# Altium footprint library FootPrintLib_9.PcbLib: 287 footprints (part 15 of 18)
Each footprint in its own frame and in the unit in brackets; x right, y up, seen from the top. Pads: shape width x height; smd on the part's side, far side on the other; paste and mask are expansions set on the pad; w line width, h text height; cw(c..) or ccw(c..) is an arc to the next point about the centre after c.
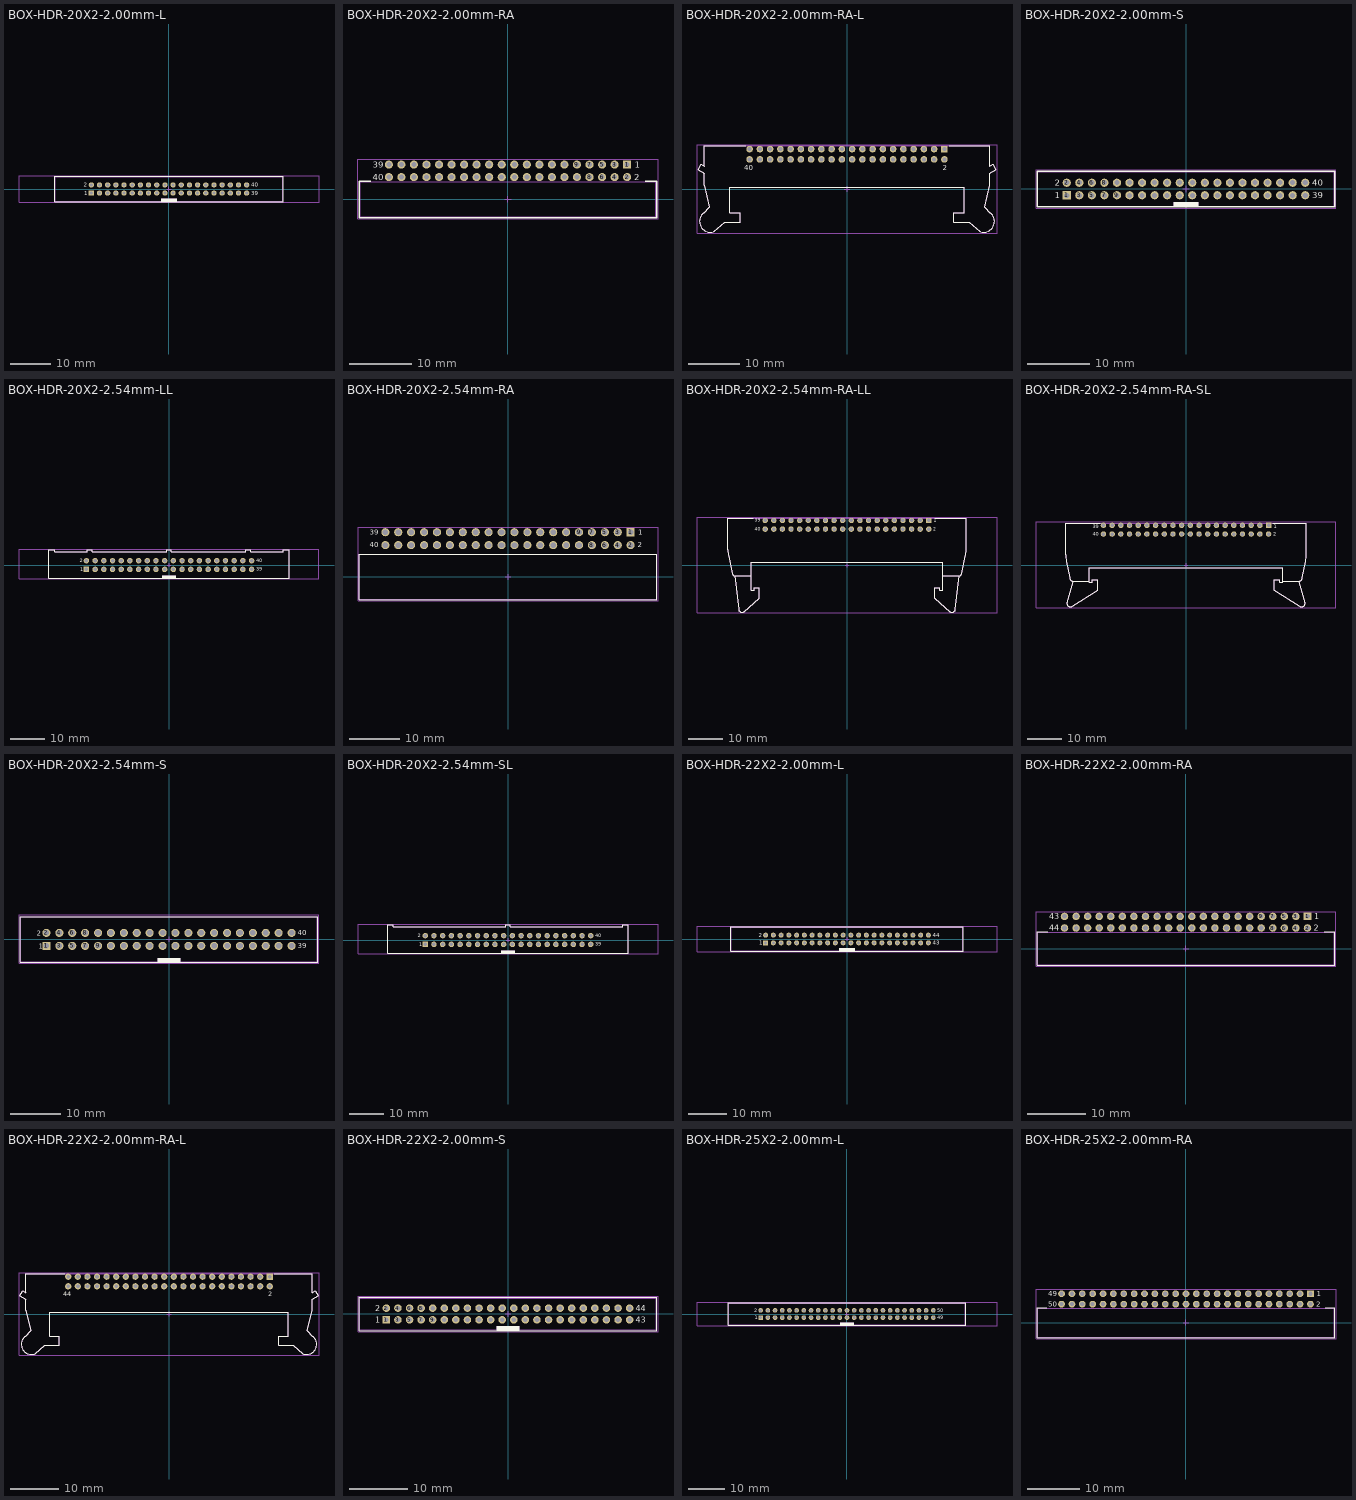
[diagram p14: the footprints below, top view; thin cyan lines are the x and y axes]

## BOX-HDR-20X2-2.00mm-L [mm] "2.00mm Male Box Header with Lever, 40p"
height 16.85
pads (40):
  rect 1.3x1.3 hole 0.8: 1(-19,-1)
  round 1.3 hole 0.8: 2(-19,1) 3(-17,-1) 4(-17,1) 5(-15,-1) 6(-15,1) 7(-13,-1) 8(-13,1) 9(-11,-1) 10(-11,1) 11(-9,-1) 12(-9,1) 13(-7,-1) 14(-7,1) 15(-5,-1) 16(-5,1) 17(-3,-1) 18(-3,1) 19(-1,-1) 20(-1,1) 21(1,-1) 22(1,1) 23(3,-1) 24(3,1) 25(5,-1) 26(5,1) 27(7,-1) 28(7,1) 29(9,-1) 30(9,1) 31(11,-1) 32(11,1) 33(13,-1) 34(13,1) 35(15,-1) 36(15,1) 37(17,-1) 38(17,1) 39(19,-1) 40(19,1)
Top Overlay:
  rectangle: -2,-3.1 2,-2.3
  lines w0.2: -28,-3.1 -28,3.1 28,3.1 28,-3.1 -28,-3.1
  text "1" at -20.7,-1.5 h1.02
  text "2" at -20.8,0.5 h1.02
  text "40" at 20.1,0.5 h1.02
  text "39" at 20.1,-1.5 h1.02
Mechanical 13:
  rectangle: -2,-3 2,-2.3
  lines w0.1: -27.85,-3 -27.85,3 27.85,3 27.85,-3 -27.85,-3
Mechanical 15:
  lines w0.05: -0.5,0 0.5,0 ; 0,-0.5 0,0.5 ; -36.7,-3.3 36.7,-3.3 36.7,3.3 -36.7,3.3 -36.7,-3.3
3D body "62504022021.stp": height 16.9, standoff -2.95, extent -29.062,-3 29.063,3

## BOX-HDR-20X2-2.00mm-RA [mm] "2.00mm Male Angled Box Header, 40p"
height 5.4
pads (40):
  rect 1.3x1.3 hole 0.8: 1(19,5.55)
  round 1.3 hole 0.8: 2(19,3.55) 3(17,5.55) 4(17,3.55) 5(15,5.55) 6(15,3.55) 7(13,5.55) 8(13,3.55) 9(11,5.55) 10(11,3.55) 11(9,5.55) 12(9,3.55) 13(7,5.55) 14(7,3.55) 15(5,5.55) 16(5,3.55) 17(3,5.55) 18(3,3.55) 19(1,5.55) 20(1,3.55) 21(-1,5.55) 22(-1,3.55) 23(-3,5.55) 24(-3,3.55) 25(-5,5.55) 26(-5,3.55) 27(-7,5.55) 28(-7,3.55) 29(-9,5.55) 30(-9,3.55) 31(-11,5.55) 32(-11,3.55) 33(-13,5.55) 34(-13,3.55) 35(-15,5.55) 36(-15,3.55) 37(-17,5.55) 38(-17,3.55) 39(-19,5.55) 40(-19,3.55)
Top Overlay:
  lines w0.2: -21.875,2.9 -23.725,2.9 -23.725,-2.9 23.725,-2.9 23.725,2.9 21.875,2.9
  text "1" at 20.2,5.075 h1.02
  text "2" at 20.1,3.075 h1.02
  text "39" at -21.6,5.075 h1.02
  text "40" at -21.6,3.075 h1.02
Mechanical 13:
  lines w0.1: -23.6,-2.8 -23.6,2.8 23.6,2.8 23.6,-2.8 -23.6,-2.8
Mechanical 15:
  lines w0.05: -0.5,0 0.5,0 ; 0,-0.5 0,0.5 ; -23.925,-3.1 -23.925,6.4 23.925,6.4 23.925,-3.1 -23.925,-3.1
3D body "62504021721 (rev1).stp": height 5.5, standoff -2.85, extent -23.6,-2.8 23.6,5.8

## BOX-HDR-20X2-2.00mm-RA-L [mm] "2.00mm Male Angled Box Header with Lever, 40p"
height 3.15
pads (40):
  rect 1.3x1.3 hole 0.8: 1(19,7.775)
  round 1.3 hole 0.8: 2(19,5.775) 3(17,7.775) 4(17,5.775) 5(15,7.775) 6(15,5.775) 7(13,7.775) 8(13,5.775) 9(11,7.775) 10(11,5.775) 11(9,7.775) 12(9,5.775) 13(7,7.775) 14(7,5.775) 15(5,7.775) 16(5,5.775) 17(3,7.775) 18(3,5.775) 19(1,7.775) 20(1,5.775) 21(-1,7.775) 22(-1,5.775) 23(-3,7.775) 24(-3,5.775) 25(-5,7.775) 26(-5,5.775) 27(-7,7.775) 28(-7,5.775) 29(-9,7.775) 30(-9,5.775) 31(-11,7.775) 32(-11,5.775) 33(-13,7.775) 34(-13,5.775) 35(-15,7.775) 36(-15,5.775) 37(-17,7.775) 38(-17,5.775) 39(-19,7.775) 40(-19,5.775)
Top Overlay:
  lines w0.2: -28.466,4.813 -29.06,3.785 -27.851,3.087 -27.851,0.753 ; -28.46,4.815 -27.848,4.462 ; -27.894,-4.611 ccw(c-26.68,-6.325) -25.865,-8.26 ; -27.892,-4.613 -26.85,-3.535 -27.837,0.738 ; -27.85,4.464 -27.85,8.425 -19.75,8.425 ; -25.866,-8.259 -23.85,-6.475 -20.85,-6.475 -20.85,-4.675 -22.85,-4.675 -22.85,0.325 22.85,0.325 22.85,-4.675 20.85,-4.675 20.85,-6.475 23.85,-6.475 25.866,-8.259 ; 19.95,8.425 27.85,8.425 27.85,4.464 ; 25.865,-8.26 ccw(c26.68,-6.325) 27.894,-4.611 ; 27.837,0.738 26.85,-3.535 27.892,-4.613 ; 27.848,4.462 28.46,4.815 ; 27.851,0.753 27.851,3.087 29.06,3.785 28.466,4.813
  text "40" at -20,3.675 h1.02
  text "2" at 18.7,3.675 h1.02
Mechanical 13:
  lines w0.1: -28.466,4.813 -29.06,3.785 -27.851,3.087 -27.851,0.753 ; -28.46,4.815 -27.848,4.462 ; -27.894,-4.611 ccw(c-26.68,-6.325) -25.865,-8.26 ; -27.892,-4.613 -26.85,-3.535 -27.837,0.738 ; -27.85,4.464 -27.85,8.425 27.85,8.425 ; -25.866,-8.259 -23.85,-6.475 -20.85,-6.475 -20.85,-4.675 -22.85,-4.675 -22.85,0.325 22.85,0.325 22.85,-4.675 20.85,-4.675 20.85,-6.475 23.85,-6.475 25.866,-8.259 ; 25.865,-8.26 ccw(c26.68,-6.325) 27.894,-4.611 ; 27.837,0.738 26.85,-3.535 27.892,-4.613 ; 27.848,4.462 28.46,4.815 ; 27.848,8.423 27.85,8.425 ; 27.85,4.464 27.85,8.425 ; 27.851,0.753 27.851,3.087 29.06,3.785 28.466,4.813
Mechanical 15:
  lines w0.05: -0.5,0 0.5,0 ; 0,-0.5 0,0.5 ; -29.262,-8.625 29.262,-8.625 29.262,8.625 -29.262,8.625 -29.262,-8.625
3D body "62504022121.stp": height 6.1, standoff -3.05, extent -29.062,-8.425 29.062,8.425

## BOX-HDR-20X2-2.00mm-S [mm] "2.00mm Male Box Header, 40p"
height 5.6
pads (40):
  rect 1.3x1.3 hole 0.8: 1(-19,-1)
  round 1.3 hole 0.8: 2(-19,1) 3(-17,-1) 4(-17,1) 5(-15,-1) 6(-15,1) 7(-13,-1) 8(-13,1) 9(-11,-1) 10(-11,1) 11(-9,-1) 12(-9,1) 13(-7,-1) 14(-7,1) 15(-5,-1) 16(-5,1) 17(-3,-1) 18(-3,1) 19(-1,-1) 20(-1,1) 21(1,-1) 22(1,1) 23(3,-1) 24(3,1) 25(5,-1) 26(5,1) 27(7,-1) 28(7,1) 29(9,-1) 30(9,1) 31(11,-1) 32(11,1) 33(13,-1) 34(13,1) 35(15,-1) 36(15,1) 37(17,-1) 38(17,1) 39(19,-1) 40(19,1)
Top Overlay:
  rectangle: -2,-2.85 2,-2.05
  lines w0.2: -23.7,-2.85 23.7,-2.85 23.7,2.85 -23.7,2.85 -23.7,-2.85
  text "40" at 20.1,0.5 h1.02
  text "39" at 20.1,-1.5 h1.02
  text "1" at -20.9,-1.5 h1.02
  text "2" at -20.9,0.5 h1.02
Mechanical 13:
  rectangle: -2,-2.75 2,-2.05
  lines w0.1: -23.6,-2.75 -23.6,2.75 23.6,2.75 23.6,-2.75 -23.6,-2.75
Mechanical 15:
  lines w0.05: -0.5,0 0.5,0 ; 0,-0.5 0,0.5 ; -23.9,-3.05 -23.9,3.05 23.9,3.05 23.9,-3.05 -23.9,-3.05
3D body "62504021621.stp": height 5.65, standoff -2.5, extent -23.6,-2.75 23.6,2.75

## BOX-HDR-20X2-2.54mm-LL [mm] "40 pins, straight, long lever, gold plating"
height 28
pads (40):
  rect 1.6x1.6 hole 1.02: 1(-24.13,-1.27)
  round 1.6 hole 1.02: 2(-24.13,1.27) 3(-21.59,-1.27) 4(-21.59,1.27) 5(-19.05,-1.27) 6(-19.05,1.27) 7(-16.51,-1.27) 8(-16.51,1.27) 9(-13.97,-1.27) 10(-13.97,1.27) 11(-11.43,-1.27) 12(-11.43,1.27) 13(-8.89,-1.27) 14(-8.89,1.27) 15(-6.35,-1.27) 16(-6.35,1.27) 17(-3.81,-1.27) 18(-3.81,1.27) 19(-1.27,-1.27) 20(-1.27,1.27) 21(1.27,-1.27) 22(1.27,1.27) 23(3.81,-1.27) 24(3.81,1.27) 25(6.35,-1.27) 26(6.35,1.27) 27(8.89,-1.27) 28(8.89,1.27) 29(11.43,-1.27) 30(11.43,1.27) 31(13.97,-1.27) 32(13.97,1.27) 33(16.51,-1.27) 34(16.51,1.27) 35(19.05,-1.27) 36(19.05,1.27) 37(21.59,-1.27) 38(21.59,1.27) 39(24.13,-1.27) 40(24.13,1.27)
Top Overlay:
  rectangle: -2.1,-3.85 2.1,-3.04
  lines w0.2: -35.15,-3.85 -35.15,4.45 -33.42,4.45 -33.42,3.85 -23.85,3.85 -23.85,4.45 -22.45,4.45 -22.45,3.85 -0.7,3.85 -0.7,4.45 0.7,4.45 0.7,3.85 22.45,3.85 22.45,4.45 23.85,4.45 23.85,3.85 33.42,3.85 33.42,4.45 35.15,4.45 35.15,-3.85 -35.15,-3.85
  text "1" at -25.95,-1.8 h1.02
  text "2" at -26.15,0.8 h1.02
  text "39" at 25.55,-1.74 h1.02
  text "40" at 25.55,0.8 h1.02
Mechanical 13:
  rectangle: -2.1,-3.85 2.1,-3.04
  lines w0.1: -35.15,-3.85 35.15,-3.85 35.15,4.45 33.42,4.45 33.42,3.85 23.85,3.85 23.85,4.45 22.45,4.45 22.45,3.85 0.7,3.85 0.7,4.45 -0.7,4.45 -0.7,3.85 -22.45,3.85 -22.45,4.45 -23.85,4.45 -23.85,3.85 -33.42,3.85 -33.42,4.45 -35.15,4.45 -35.15,-3.85
Mechanical 15:
  lines w0.05: -0.5,0 0.5,0 ; 0,-0.5 0,0.5 ; -43.85,-4.05 43.85,-4.05 43.85,4.65 -43.85,4.65 -43.85,-4.05
3D body "61204022821 (rev1).stp": height 27.84, standoff -3.35, extent -35.15,-3.86 35.15,4.45

## BOX-HDR-20X2-2.54mm-RA [mm] "40 pins, right angled, gold plating"
height 9.1
pads (40):
  rect 1.6x1.6 hole 1.1: 1(24.13,8.805)
  round 1.6 hole 1.1: 2(24.13,6.265) 3(21.59,8.805) 4(21.59,6.265) 5(19.05,8.805) 6(19.05,6.265) 7(16.51,8.805) 8(16.51,6.265) 9(13.97,8.805) 10(13.97,6.265) 11(11.43,8.805) 12(11.43,6.265) 13(8.89,8.805) 14(8.89,6.265) 15(6.35,8.805) 16(6.35,6.265) 17(3.81,8.805) 18(3.81,6.265) 19(1.27,8.805) 20(1.27,6.265) 21(-1.27,8.805) 22(-1.27,6.265) 23(-3.81,8.805) 24(-3.81,6.265) 25(-6.35,8.805) 26(-6.35,6.265) 27(-8.89,8.805) 28(-8.89,6.265) 29(-11.43,8.805) 30(-11.43,6.265) 31(-13.97,8.805) 32(-13.97,6.265) 33(-16.51,8.805) 34(-16.51,6.265) 35(-19.05,8.805) 36(-19.05,6.265) 37(-21.59,8.805) 38(-21.59,6.265) 39(-24.13,8.805) 40(-24.13,6.265)
Top Overlay:
  lines w0.2: -29.305,-4.5 29.305,-4.5 29.305,4.5 -29.305,4.5 -29.305,-4.5
  text "1" at 25.59,8.34 h1.02
  text "2" at 25.49,5.8 h1.02
  text "39" at -27.2,8.34 h1.02
  text "40" at -27.2,5.8 h1.02
Mechanical 13:
  lines w0.1: -29.23,-4.425 29.23,-4.425 29.23,4.425 -29.23,4.425 -29.23,-4.425
Mechanical 15:
  lines w0.05: -0.5,0 0.5,0 ; 0,-0.5 0,0.5 ; -29.505,-4.7 -29.505,9.805 29.505,9.805 29.505,-4.7 -29.505,-4.7
3D body "61204021721.stp": height 9.23, standoff -2.88, extent -29.23,-4.425 29.23,9.125

## BOX-HDR-20X2-2.54mm-RA-LL [mm] "40 pins, right angeled, long lever, gold plating"
height 10.8
pads (40):
  rect 1.6x1.6 hole 1.02: 1(24.13,13.23)
  round 1.6 hole 1.02: 2(24.13,10.69) 3(21.59,13.23) 4(21.59,10.69) 5(19.05,13.23) 6(19.05,10.69) 7(16.51,13.23) 8(16.51,10.69) 9(13.97,13.23) 10(13.97,10.69) 11(11.43,13.23) 12(11.43,10.69) 13(8.89,13.23) 14(8.89,10.69) 15(6.35,13.23) 16(6.35,10.69) 17(3.81,13.23) 18(3.81,10.69) 19(1.27,13.23) 20(1.27,10.69) 21(-1.27,13.23) 22(-1.27,10.69) 23(-3.81,13.23) 24(-3.81,10.69) 25(-6.35,13.23) 26(-6.35,10.69) 27(-8.89,13.23) 28(-8.89,10.69) 29(-11.43,13.23) 30(-11.43,10.69) 31(-13.97,13.23) 32(-13.97,10.69) 33(-16.51,13.23) 34(-16.51,10.69) 35(-19.05,13.23) 36(-19.05,10.69) 37(-21.59,13.23) 38(-21.59,10.69) 39(-24.13,13.23) 40(-24.13,10.69)
Top Overlay:
  lines w0.2: -35.15,4.54 -35.15,13.85 -27.7,13.85 ; -35.145,4.54 ccw(c-25.15,4.84) -34.904,2.636 -33.859,-2.534 ; -33.853,-2.533 ccw(c-32.93,-2.15) -32.93,-3.15 -28.25,-3.15 ; -33.114,-3.15 -31.968,-13.022 ccw(c-30.98,-12.87) -30.322,-13.623 -25.851,-9.758 ; -25.85,-9.76 -25.85,-6.66 -27.35,-6.66 -27.35,-7.37 -28.25,-7.37 -28.25,0.85 28.25,0.85 28.25,-7.37 27.35,-7.37 27.35,-6.66 25.85,-6.66 25.85,-9.76 ; 25.851,-9.758 30.323,-13.623 ccw(c30.98,-12.87) 31.968,-13.022 33.114,-3.15 ; 26.1,13.85 35.15,13.85 35.15,4.54 ; 28.25,-3.15 32.93,-3.15 ccw(c32.93,-2.15) 33.854,-2.533 ; 33.859,-2.534 34.904,2.636 ccw(c25.15,4.84) 35.146,4.54
  text "2" at 25.45,10.26 h1.02
  text "1" at 25.55,12.66 h1.02
  text "40" at -27.2,10.26 h1.02
  text "39" at -27.2,12.8 h1.02
Mechanical 13:
  lines w0.1: -35.15,4.54 -35.15,13.85 35.15,13.85 35.15,4.54 ; -35.145,4.54 ccw(c-25.15,4.84) -34.904,2.636 -33.859,-2.534 ; -33.853,-2.533 ccw(c-32.93,-2.15) -32.93,-3.15 -28.25,-3.15 ; -33.114,-3.15 -31.968,-13.022 ccw(c-30.98,-12.87) -30.322,-13.623 -25.851,-9.758 ; -25.85,-9.76 -25.85,-6.66 -27.35,-6.66 -27.35,-7.37 -28.25,-7.37 -28.25,0.85 28.25,0.85 28.25,-7.37 27.35,-7.37 27.35,-6.66 25.85,-6.66 25.85,-9.76 ; 25.851,-9.758 30.323,-13.623 ccw(c30.98,-12.87) 31.968,-13.022 33.114,-3.15 ; 28.25,-3.15 32.93,-3.15 ccw(c32.93,-2.15) 33.854,-2.533 ; 33.859,-2.534 34.904,2.636 ccw(c25.15,4.84) 35.146,4.54
Mechanical 15:
  lines w0.05: -0.5,0 0.5,0 ; 0,-0.5 0,0.5 ; -44.25,-14.06 44.25,-14.06 44.25,14.23 -44.25,14.23 -44.25,-14.06
3D body "61204022921 (rev1).stp": height 8.35, standoff -2.35, extent -35.15,-13.871 35.15,13.85

## BOX-HDR-20X2-2.54mm-RA-SL [mm] "40 pins, right angeled, short lever, gold plating"
height 8.3
pads (40):
  rect 1.6x1.6 hole 1.02: 1(24.13,11.63)
  round 1.6 hole 1.02: 2(24.13,9.09) 3(21.59,11.63) 4(21.59,9.09) 5(19.05,11.63) 6(19.05,9.09) 7(16.51,11.63) 8(16.51,9.09) 9(13.97,11.63) 10(13.97,9.09) 11(11.43,11.63) 12(11.43,9.09) 13(8.89,11.63) 14(8.89,9.09) 15(6.35,11.63) 16(6.35,9.09) 17(3.81,11.63) 18(3.81,9.09) 19(1.27,11.63) 20(1.27,9.09) 21(-1.27,11.63) 22(-1.27,9.09) 23(-3.81,11.63) 24(-3.81,9.09) 25(-6.35,11.63) 26(-6.35,9.09) 27(-8.89,11.63) 28(-8.89,9.09) 29(-11.43,11.63) 30(-11.43,9.09) 31(-13.97,11.63) 32(-13.97,9.09) 33(-16.51,11.63) 34(-16.51,9.09) 35(-19.05,11.63) 36(-19.05,9.09) 37(-21.59,11.63) 38(-21.59,9.09) 39(-24.13,11.63) 40(-24.13,9.09)
Top Overlay:
  lines w0.2: -34.014,-3.751 -34.956,1.138 cw(c-25.15,3.1) -35.15,3.1 -35.15,12.25 -25.05,12.25 ; -34.01,-3.75 ccw(c-33.01,-3.75) -33.01,-4.75 ; -33.105,-4.75 -28.35,-4.75 ; -32.924,-4.851 -34.757,-10.941 ccw(c-33.8,-11.23) -33.25,-12.066 -25.85,-7.33 -25.85,-4.23 -27.35,-4.23 -27.35,-4.94 -28.35,-4.94 -28.35,-0.75 28.35,-0.75 28.35,-4.94 27.35,-4.94 27.35,-4.23 25.85,-4.23 25.85,-7.33 33.25,-12.067 ccw(c33.8,-11.23) 34.757,-10.941 32.924,-4.851 ; 25.3,12.25 35.15,12.25 35.15,3.1 cw(c25.15,3.1) 34.956,1.138 34.014,-3.751 ; 28.35,-4.75 33.105,-4.75 ; 33.01,-4.75 ccw(c33.01,-3.75) 34.01,-3.75
  text "1" at 25.65,10.8 h1.02
  text "2" at 25.55,8.6 h1.02
  text "40" at -27.2,8.6 h1.02
  text "39" at -27.2,10.8 h1.02
Mechanical 13:
  lines w0.1: -34.014,-3.751 -34.956,1.138 cw(c-25.15,3.1) -35.15,3.1 -35.15,12.25 35.15,12.25 35.15,3.1 cw(c25.15,3.1) 34.956,1.138 34.014,-3.751 ; -34.01,-3.75 ccw(c-33.01,-3.75) -33.01,-4.75 ; -33.105,-4.75 -28.35,-4.75 ; -32.924,-4.851 -34.757,-10.941 ccw(c-33.8,-11.23) -33.25,-12.066 -25.85,-7.33 -25.85,-4.23 -27.35,-4.23 -27.35,-4.94 -28.35,-4.94 -28.35,-0.75 28.35,-0.75 28.35,-4.94 27.35,-4.94 27.35,-4.23 25.85,-4.23 25.85,-7.33 33.25,-12.067 ccw(c33.8,-11.23) 34.757,-10.941 32.924,-4.851 ; 28.35,-4.75 33.105,-4.75 ; 33.01,-4.75 ccw(c33.01,-3.75) 34.01,-3.75
Mechanical 15:
  lines w0.05: -0.5,0 0.5,0 ; 0,-0.5 0,0.5 ; -43.85,-12.45 -43.85,12.63 43.85,12.63 43.85,-12.45 -43.85,-12.45
3D body "61204022121.stp": height 8.35, standoff -3.35, extent -35.15,-12.25 35.15,12.25

## BOX-HDR-20X2-2.54mm-S [mm] "40 pins, straight, gold plating"
height 9.1
pads (40):
  rect 1.6x1.6 hole 1.1: 1(-24.13,-1.27)
  round 1.6 hole 1.1: 2(-24.13,1.27) 3(-21.59,-1.27) 4(-21.59,1.27) 5(-19.05,-1.27) 6(-19.05,1.27) 7(-16.51,-1.27) 8(-16.51,1.27) 9(-13.97,-1.27) 10(-13.97,1.27) 11(-11.43,-1.27) 12(-11.43,1.27) 13(-8.89,-1.27) 14(-8.89,1.27) 15(-6.35,-1.27) 16(-6.35,1.27) 17(-3.81,-1.27) 18(-3.81,1.27) 19(-1.27,-1.27) 20(-1.27,1.27) 21(1.27,-1.27) 22(1.27,1.27) 23(3.81,-1.27) 24(3.81,1.27) 25(6.35,-1.27) 26(6.35,1.27) 27(8.89,-1.27) 28(8.89,1.27) 29(11.43,-1.27) 30(11.43,1.27) 31(13.97,-1.27) 32(13.97,1.27) 33(16.51,-1.27) 34(16.51,1.27) 35(19.05,-1.27) 36(19.05,1.27) 37(21.59,-1.27) 38(21.59,1.27) 39(24.13,-1.27) 40(24.13,1.27)
Top Overlay:
  rectangle: -2.25,-4.5 2.25,-3.7
  lines w0.2: -29.33,-4.5 -29.33,4.5 29.33,4.5 29.33,-4.5 -29.33,-4.5
  text "40" at 25.39,0.8 h1.02
  text "39" at 25.39,-1.74 h1.02
  text "2" at -25.99,0.74 h1.02
  text "1" at -25.69,-1.8 h1.02
Mechanical 13:
  rectangle: -2.25,-4.425 2.25,-3.7
  lines w0.1: -29.23,-4.425 29.23,-4.425 29.23,4.425 -29.23,4.425 -29.23,-4.425
Mechanical 15:
  lines w0.05: -0.5,0 0.5,0 ; 0,-0.5 0,0.5 ; -29.53,-4.7 -29.53,4.85 29.53,4.85 29.53,-4.7 -29.53,-4.7
3D body "61204021621.stp": height 9.13, standoff -2.98, extent -29.23,-4.425 29.23,4.75

## BOX-HDR-20X2-2.54mm-SL [mm] "40 pins, straight, short lever, gold plating"
height 24.5
pads (40):
  rect 1.6x1.6 hole 1.02: 1(-24.13,-1.27)
  round 1.6 hole 1.02: 2(-24.13,1.27) 3(-21.59,-1.27) 4(-21.59,1.27) 5(-19.05,-1.27) 6(-19.05,1.27) 7(-16.51,-1.27) 8(-16.51,1.27) 9(-13.97,-1.27) 10(-13.97,1.27) 11(-11.43,-1.27) 12(-11.43,1.27) 13(-8.89,-1.27) 14(-8.89,1.27) 15(-6.35,-1.27) 16(-6.35,1.27) 17(-3.81,-1.27) 18(-3.81,1.27) 19(-1.27,-1.27) 20(-1.27,1.27) 21(1.27,-1.27) 22(1.27,1.27) 23(3.81,-1.27) 24(3.81,1.27) 25(6.35,-1.27) 26(6.35,1.27) 27(8.89,-1.27) 28(8.89,1.27) 29(11.43,-1.27) 30(11.43,1.27) 31(13.97,-1.27) 32(13.97,1.27) 33(16.51,-1.27) 34(16.51,1.27) 35(19.05,-1.27) 36(19.05,1.27) 37(21.59,-1.27) 38(21.59,1.27) 39(24.13,-1.27) 40(24.13,1.27)
Top Overlay:
  rectangle: -2.1,-3.85 2.1,-3.05
  lines w0.2: -0.7,4.45 -0.7,3.85 -33.5,3.85 -33.5,4.45 -35.05,4.45 -35.05,-3.85 35.05,-3.85 35.05,4.45 33.5,4.45 33.5,3.85 0.7,3.85 0.7,4.45 -0.7,4.45 ; -0.7,4.45 -0.7,4.45
  text "1" at -25.95,-1.8 h1.02
  text "2" at -26.25,0.8 h1.02
  text "40" at 25.45,0.8 h1.02
  text "39" at 25.45,-1.74 h1.02
Mechanical 13:
  rectangle: -2.1,-3.85 2.1,-3.05
  lines w0.1: -0.7,4.45 0.7,4.45 0.7,3.85 33.5,3.85 33.5,4.45 35.05,4.45 35.05,-3.85 -35.05,-3.85 -35.05,4.45 -33.5,4.45 -33.5,3.85 -0.7,3.85 -0.7,4.45 ; -0.7,4.45 -0.7,4.45
Mechanical 15:
  lines w0.05: -0.5,0 0.5,0 ; 0,-0.5 0,0.5 ; -43.75,-4.05 43.75,-4.05 43.75,4.65 -43.75,4.65 -43.75,-4.05
3D body "61204022021.stp": height 24.55, standoff -3.35, extent -35.15,-3.85 35.15,4.45

## BOX-HDR-22X2-2.00mm-L [mm] "2.00mm Male Box Header with Lever, 44p"
height 16.85
pads (44):
  rect 1.3x1.3 hole 0.8: 1(-21,-1)
  round 1.3 hole 0.8: 2(-21,1) 3(-19,-1) 4(-19,1) 5(-17,-1) 6(-17,1) 7(-15,-1) 8(-15,1) 9(-13,-1) 10(-13,1) 11(-11,-1) 12(-11,1) 13(-9,-1) 14(-9,1) 15(-7,-1) 16(-7,1) 17(-5,-1) 18(-5,1) 19(-3,-1) 20(-3,1) 21(-1,-1) 22(-1,1) 23(1,-1) 24(1,1) 25(3,-1) 26(3,1) 27(5,-1) 28(5,1) 29(7,-1) 30(7,1) 31(9,-1) 32(9,1) 33(11,-1) 34(11,1) 35(13,-1) 36(13,1) 37(15,-1) 38(15,1) 39(17,-1) 40(17,1) 41(19,-1) 42(19,1) 43(21,-1) 44(21,1)
Top Overlay:
  rectangle: -2,-3.1 2,-2.3
  lines w0.2: -30,-3.1 -30,3.1 30,3.1 30,-3.1 -30,-3.1
  text "1" at -22.7,-1.5 h1.02
  text "2" at -22.8,0.5 h1.02
  text "43" at 22.1,-1.5 h1.02
  text "44" at 22.1,0.5 h1.02
Mechanical 13:
  rectangle: -2,-3 2,-2.3
  lines w0.1: -29.85,-3 -29.85,3 29.85,3 29.85,-3 -29.85,-3
Mechanical 15:
  lines w0.05: -0.5,0 0.5,0 ; 0,-0.5 0,0.5 ; -38.7,-3.3 38.7,-3.3 38.7,3.3 -38.7,3.3 -38.7,-3.3
3D body "62504422021.stp": height 16.9, standoff -2.95, extent -31.062,-3 31.063,3

## BOX-HDR-22X2-2.00mm-RA [mm] "2.00mm Male Angled Box Header, 44p"
height 5.4
pads (44):
  rect 1.3x1.3 hole 0.8: 1(21,5.55)
  round 1.3 hole 0.8: 2(21,3.55) 3(19,5.55) 4(19,3.55) 5(17,5.55) 6(17,3.55) 7(15,5.55) 8(15,3.55) 9(13,5.55) 10(13,3.55) 11(11,5.55) 12(11,3.55) 13(9,5.55) 14(9,3.55) 15(7,5.55) 16(7,3.55) 17(5,5.55) 18(5,3.55) 19(3,5.55) 20(3,3.55) 21(1,5.55) 22(1,3.55) 23(-1,5.55) 24(-1,3.55) 25(-3,5.55) 26(-3,3.55) 27(-5,5.55) 28(-5,3.55) 29(-7,5.55) 30(-7,3.55) 31(-9,5.55) 32(-9,3.55) 33(-11,5.55) 34(-11,3.55) 35(-13,5.55) 36(-13,3.55) 37(-15,5.55) 38(-15,3.55) 39(-17,5.55) 40(-17,3.55) 41(-19,5.55) 42(-19,3.55) 43(-21,5.55) 44(-21,3.55)
Top Overlay:
  lines w0.2: -23.875,2.9 -25.725,2.9 -25.725,-2.9 25.725,-2.9 25.725,2.9 23.875,2.9
  text "1" at 22.2,5.075 h1.02
  text "2" at 22.1,3.075 h1.02
  text "43" at -23.6,5.075 h1.02
  text "44" at -23.6,3.075 h1.02
Mechanical 13:
  lines w0.1: -25.6,-2.8 -25.6,2.8 25.6,2.8 25.6,-2.8 -25.6,-2.8
Mechanical 15:
  lines w0.05: -0.5,0 0.5,0 ; 0,-0.5 0,0.5 ; -25.925,-3.1 -25.925,6.4 25.925,6.4 25.925,-3.1 -25.925,-3.1
3D body "62504421721 (rev1).stp": height 5.5, standoff -2.85, extent -25.6,-2.8 25.6,5.8

## BOX-HDR-22X2-2.00mm-RA-L [mm] "2.00mm Male Angled Box Header with Lever, 44p"
height 3.15
pads (44):
  rect 1.3x1.3 hole 0.8: 1(21,7.775)
  round 1.3 hole 0.8: 2(21,5.775) 3(19,7.775) 4(19,5.775) 5(17,7.775) 6(17,5.775) 7(15,7.775) 8(15,5.775) 9(13,7.775) 10(13,5.775) 11(11,7.775) 12(11,5.775) 13(9,7.775) 14(9,5.775) 15(7,7.775) 16(7,5.775) 17(5,7.775) 18(5,5.775) 19(3,7.775) 20(3,5.775) 21(1,7.775) 22(1,5.775) 23(-1,7.775) 24(-1,5.775) 25(-3,7.775) 26(-3,5.775) 27(-5,7.775) 28(-5,5.775) 29(-7,7.775) 30(-7,5.775) 31(-9,7.775) 32(-9,5.775) 33(-11,7.775) 34(-11,5.775) 35(-13,7.775) 36(-13,5.775) 37(-15,7.775) 38(-15,5.775) 39(-17,7.775) 40(-17,5.775) 41(-19,7.775) 42(-19,5.775) 43(-21,7.775) 44(-21,5.775)
Top Overlay:
  lines w0.2: -30.466,4.813 -31.06,3.785 -29.851,3.087 -29.851,0.753 ; -30.46,4.815 -29.848,4.462 ; -29.894,-4.611 ccw(c-28.68,-6.325) -27.865,-8.26 ; -29.892,-4.613 -28.85,-3.535 -29.837,0.738 ; -29.85,4.464 -29.85,8.425 -21.75,8.425 ; -27.866,-8.259 -25.85,-6.475 -22.85,-6.475 -22.85,-4.675 -24.85,-4.675 -24.85,0.325 24.85,0.325 24.85,-4.675 22.85,-4.675 22.85,-6.475 25.85,-6.475 27.866,-8.259 ; 21.95,8.425 29.85,8.425 29.85,4.464 ; 27.865,-8.26 ccw(c28.68,-6.325) 29.894,-4.611 ; 29.837,0.738 28.85,-3.535 29.892,-4.613 ; 29.848,4.462 30.46,4.815 ; 29.851,0.753 29.851,3.087 31.06,3.785 30.466,4.813
  text "44" at -22,3.675 h1.02
  text "2" at 20.7,3.675 h1.02
Mechanical 13:
  lines w0.1: -30.466,4.813 -31.06,3.785 -29.851,3.087 -29.851,0.753 ; -30.46,4.815 -29.848,4.462 ; -29.894,-4.611 ccw(c-28.68,-6.325) -27.865,-8.26 ; -29.892,-4.613 -28.85,-3.535 -29.837,0.738 ; -29.85,4.464 -29.85,8.425 29.85,8.425 ; -27.866,-8.259 -25.85,-6.475 -22.85,-6.475 -22.85,-4.675 -24.85,-4.675 -24.85,0.325 24.85,0.325 24.85,-4.675 22.85,-4.675 22.85,-6.475 25.85,-6.475 27.866,-8.259 ; 27.865,-8.26 ccw(c28.68,-6.325) 29.894,-4.611 ; 29.837,0.738 28.85,-3.535 29.892,-4.613 ; 29.848,4.462 30.46,4.815 ; 29.848,8.423 29.85,8.425 ; 29.85,4.464 29.85,8.425 ; 29.851,0.753 29.851,3.087 31.06,3.785 30.466,4.813
Mechanical 15:
  lines w0.05: -0.5,0 0.5,0 ; 0,-0.5 0,0.5 ; -31.262,-8.625 31.262,-8.625 31.262,8.625 -31.262,8.625 -31.262,-8.625
3D body "62504422121.stp": height 6.1, standoff -3.05, extent -31.062,-8.425 31.062,8.425

## BOX-HDR-22X2-2.00mm-S [mm] "2.00mm Male Box Header, 44p"
height 5.6
pads (44):
  rect 1.3x1.3 hole 0.8: 1(-21,-1)
  round 1.3 hole 0.8: 2(-21,1) 3(-19,-1) 4(-19,1) 5(-17,-1) 6(-17,1) 7(-15,-1) 8(-15,1) 9(-13,-1) 10(-13,1) 11(-11,-1) 12(-11,1) 13(-9,-1) 14(-9,1) 15(-7,-1) 16(-7,1) 17(-5,-1) 18(-5,1) 19(-3,-1) 20(-3,1) 21(-1,-1) 22(-1,1) 23(1,-1) 24(1,1) 25(3,-1) 26(3,1) 27(5,-1) 28(5,1) 29(7,-1) 30(7,1) 31(9,-1) 32(9,1) 33(11,-1) 34(11,1) 35(13,-1) 36(13,1) 37(15,-1) 38(15,1) 39(17,-1) 40(17,1) 41(19,-1) 42(19,1) 43(21,-1) 44(21,1)
Top Overlay:
  rectangle: -2,-2.85 2,-2.05
  lines w0.2: -25.7,-2.85 -25.7,2.85 25.7,2.85 25.7,-2.85 -25.7,-2.85
  text "2" at -22.9,0.5 h1.02
  text "1" at -22.9,-1.5 h1.02
  text "44" at 22.1,0.5 h1.02
  text "43" at 22.1,-1.5 h1.02
Mechanical 13:
  rectangle: -2,-2.75 2,-2.05
  lines w0.1: -25.6,-2.75 25.6,-2.75 25.6,2.75 -25.6,2.75 -25.6,-2.75
Mechanical 15:
  lines w0.05: -0.5,0 0.5,0 ; 0,-0.5 0,0.5 ; -25.9,-3.05 25.9,-3.05 25.9,3.05 -25.9,3.05 -25.9,-3.05
3D body "62504421621.stp": height 5.65, standoff -2.5, extent -25.6,-2.75 25.6,2.75

## BOX-HDR-25X2-2.00mm-L [mm] "2.00mm Male Box Header with Lever, 50p"
height 16.85
pads (50):
  rect 1.3x1.3 hole 0.8: 1(-24,-1)
  round 1.3 hole 0.8: 2(-24,1) 3(-22,-1) 4(-22,1) 5(-20,-1) 6(-20,1) 7(-18,-1) 8(-18,1) 9(-16,-1) 10(-16,1) 11(-14,-1) 12(-14,1) 13(-12,-1) 14(-12,1) 15(-10,-1) 16(-10,1) 17(-8,-1) 18(-8,1) 19(-6,-1) 20(-6,1) 21(-4,-1) 22(-4,1) 23(-2,-1) 24(-2,1) 25(0,-1) 26(0,1) 27(2,-1) 28(2,1) 29(4,-1) 30(4,1) 31(6,-1) 32(6,1) 33(8,-1) 34(8,1) 35(10,-1) 36(10,1) 37(12,-1) 38(12,1) 39(14,-1) 40(14,1) 41(16,-1) 42(16,1) 43(18,-1) 44(18,1) 45(20,-1) 46(20,1) 47(22,-1) 48(22,1) 49(24,-1) 50(24,1)
Top Overlay:
  rectangle: -2,-3.1 2,-2.3
  lines w0.2: -33,-3.1 -33,3.1 33,3.1 33,-3.1 -33,-3.1
  text "50" at 25.1,0.5 h1.02
  text "49" at 25.1,-1.5 h1.02
  text "1" at -25.7,-1.5 h1.02
  text "2" at -25.8,0.5 h1.02
Mechanical 13:
  rectangle: -2,-3 2,-2.3
  lines w0.1: -32.85,-3 -32.85,3 32.85,3 32.85,-3 -32.85,-3
Mechanical 15:
  lines w0.05: -0.5,0 0.5,0 ; 0,-0.5 0,0.5 ; -41.7,-3.3 41.7,-3.3 41.7,3.3 -41.7,3.3 -41.7,-3.3
3D body "62505022021.stp": height 16.9, standoff -2.95, extent -34.062,-3 34.063,3

## BOX-HDR-25X2-2.00mm-RA [mm] "2.00mm Male Angled Box Header, 50p"
height 5.4
pads (50):
  rect 1.3x1.3 hole 0.8: 1(24,5.55)
  round 1.3 hole 0.8: 2(24,3.55) 3(22,5.55) 4(22,3.55) 5(20,5.55) 6(20,3.55) 7(18,5.55) 8(18,3.55) 9(16,5.55) 10(16,3.55) 11(14,5.55) 12(14,3.55) 13(12,5.55) 14(12,3.55) 15(10,5.55) 16(10,3.55) 17(8,5.55) 18(8,3.55) 19(6,5.55) 20(6,3.55) 21(4,5.55) 22(4,3.55) 23(2,5.55) 24(2,3.55) 25(0,5.55) 26(0,3.55) 27(-2,5.55) 28(-2,3.55) 29(-4,5.55) 30(-4,3.55) 31(-6,5.55) 32(-6,3.55) 33(-8,5.55) 34(-8,3.55) 35(-10,5.55) 36(-10,3.55) 37(-12,5.55) 38(-12,3.55) 39(-14,5.55) 40(-14,3.55) 41(-16,5.55) 42(-16,3.55) 43(-18,5.55) 44(-18,3.55) 45(-20,5.55) 46(-20,3.55) 47(-22,5.55) 48(-22,3.55) 49(-24,5.55) 50(-24,3.55)
Top Overlay:
  lines w0.2: -26.875,2.9 -28.725,2.9 -28.725,-2.9 28.725,-2.9 28.725,2.9 26.875,2.9
  text "1" at 25.2,5.075 h1.02
  text "2" at 25.1,3.075 h1.02
  text "49" at -26.6,5.075 h1.02
  text "50" at -26.6,3.075 h1.02
Mechanical 13:
  lines w0.1: -28.6,-2.8 -28.6,2.8 28.6,2.8 28.6,-2.8 -28.6,-2.8
Mechanical 15:
  lines w0.05: -0.5,0 0.5,0 ; 0,-0.5 0,0.5 ; -28.925,-3.1 -28.925,6.4 28.925,6.4 28.925,-3.1 -28.925,-3.1
3D body "62505021721 (rev1).stp": height 5.5, standoff -2.85, extent -28.6,-2.8 28.6,5.8